# Altium integrated library SquidDebugger_V1.IntLib: 13 symbols
Pins are listed as number, name and electrical type; pins without a type are passive.

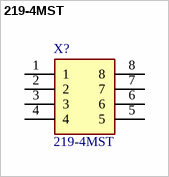
[diagram p0: symbol 219-4MST]

## 219-4MST
designator X?
DIP Switches / SIP Switches; Manufacturer_Name: CTS; Geometry.Height: 4.3mm; Manufacturer_Part_Number: 219-4MST; Mouser Part Number: 774-2194MST; Mouser Price/Stock: https://www.mouser.co.uk/ProductDetail/CTS-Electronic-Components/219-4MST?qs=qNzHFtQhdJ8xGV2Z9mul9A%3D%3D; Arrow Part Number: 219-4MST; Arrow Price/Stock: https://www.arrow.com/en/products/219-4mst/cts; Datasheet Link: https://componentsearchengine.com/Datasheets/1/219-4MST.pdf
footprint 2194MST
pins: 1, 2, 3, 4, 5, 6, 7, 8


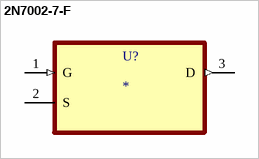
[diagram p1: symbol 2N7002-7-F]

## 2N7002-7-F
designator U?
N-Channel 60 V 115mA (Ta) 370mW (Ta) Surface Mount SOT-23-3; MP: 2N7002-7-F; MF: Diodes Inc.; Purchase-URL: https://pricing.snapeda.com/search/part/2N7002-7-F/?ref=eda; Package: SOT-23-3 Diodes Inc.; Price: None; Availability: In Stock; Value: *; Check_prices: https://www.snapeda.com/parts/2N7002-7-F/Diodes+Inc./view-part/?ref=eda; SnapEDA_Link: https://www.snapeda.com/parts/2N7002-7-F/Diodes+Inc./view-part/?ref=snap
footprint SOT103P240X110-3N
pins: 1 G (in), 2 S, 3 D (out)


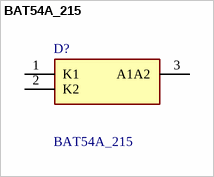
[diagram p2: symbol BAT54A_215]

## BAT54A_215
designator D?
Diode Array 1 Pair Common Anode 30 V 200mA (DC) Surface Mount TO-236-3, SC-59, SOT-23-3; Manufacturer_Name: Nexperia; Manufacturer_Part_Number: BAT54A,215; Geometry.Height: 1.1mm; Mouser Part Number: 771-BAT54A-T/R; Mouser Price/Stock: https://www.mouser.co.uk/ProductDetail/Nexperia/BAT54A215?qs=me8TqzrmIYV%252BITv%2F8aeieg%3D%3D; Arrow Part Number: BAT54A,215; Arrow Price/Stock: https://www.arrow.com/en/products/bat54a215/nexperia.html?utm_currency=USD&region=europe; Datasheet Link: https://assets.nexperia.com/documents/data-sheet/BAT54A.pdf
footprint SOT95P230X110-3N
pins: 1 K1, 2 K2, 3 A1A2


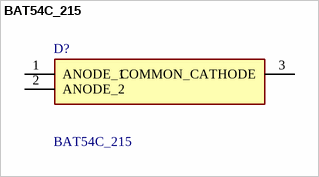
[diagram p3: symbol BAT54C_215]

## BAT54C_215
designator D?
Schottky barrier diode,BAT54C 0.2A 30V NXP BAT54C,215, Dual SMT Schottky Diode, Common Cathode, 30V 200mA, 5ns, 3-Pin TO-236AB; Manufacturer_Name: Nexperia; Geometry.Height: 1.1mm; Manufacturer_Part_Number: BAT54C,215; Mouser Part Number: 771-BAT54C-T/R; Mouser Price/Stock: https://www.mouser.co.uk/ProductDetail/Nexperia/BAT54C215?qs=me8TqzrmIYV5SKKt13YKQA%3D%3D; Arrow Part Number: BAT54C,215; Arrow Price/Stock: https://www.arrow.com/en/products/bat54c215/nexperia.html?utm_currency=USD&region=asia; Datasheet Link: https://assets.nexperia.com/documents/data-sheet/BAT54_SER.pdf
footprint BAT54C215
pins: 1 ANODE_1, 2 ANODE_2, 3 COMMON_CATHODE


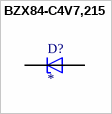
[diagram p4: symbol BZX84-C4V7,215]

## BZX84-C4V7,215
designator D?
MF: {'manufacturer': u'Nexperia USA Inc.'}; MP: BZX84-C4V7,215; Package: None; Price: None; Value: *; Availability: Unavailable
footprint SOT95P230X110-3N
pins: 1 A, 3 C


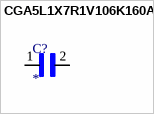
[diagram p5: symbol CGA5L1X7R1V106K160AE]

## CGA5L1X7R1V106K160AE
designator C?
10 ÂµF Â±10% 35V é™¶ç“·ç”µå®¹å™¨ X7R 1206ï¼ˆ3216 å…¬åˆ¶ï¼‰; MF: TDK; MP: CGA5L1X7R1V106K160AE; Package: 3216 TDK; Price: None; Check_prices: https://www.snapeda.com/parts/CGA5L1X7R1V106K160AE/TDK/view-part/?ref=eda; Value: *; SnapEDA_Link: https://www.snapeda.com/parts/CGA5L1X7R1V106K160AE/TDK/view-part/?ref=snap; Availability: In Stock; Purchase-URL: https://pricing.snapeda.com/search/part/CGA5L1X7R1V106K160AE/?ref=eda
footprint CAPC3216X190N
pins: 1, 2


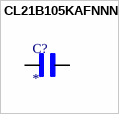
[diagram p6: symbol CL21B105KAFNNNE]

## CL21B105KAFNNNE
designator C?
1 ÂµF Â±10% 25V Ceramic Capacitor X7R 0805 (2012 Metric); MF: Samsung Electro-Mechanics; MP: CL21B105KAFNNNE; SnapEDA_Link: https://www.snapeda.com/parts/CL21B105KAFNNNE/Samsung/view-part/?ref=snap; Package: SMD-2 Samsung; Value: *; Check_prices: https://www.snapeda.com/parts/CL21B105KAFNNNE/Samsung/view-part/?ref=eda
footprint CAPC2012X135N
pins: 1, 2


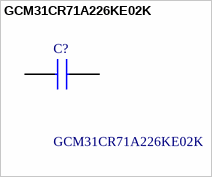
[diagram p7: symbol GCM31CR71A226KE02K]

## GCM31CR71A226KE02K
designator C?
Capacitor GCM31 L=3.2mm W=1.6mm T=1.6mm; Manufacturer_Name: Murata Electronics; Geometry.Height: 1.8mm; Manufacturer_Part_Number: GCM31CR71A226KE02K; Mouser Part Number: 81-GCM31CR71A226KE2K; Mouser Price/Stock: https://www.mouser.co.uk/ProductDetail/Murata-Electronics/GCM31CR71A226KE02K?qs=QzBtWTOodeVgM6QlH6X51g%3D%3D; Arrow Part Number: GCM31CR71A226KE02K; Arrow Price/Stock: https://www.arrow.com/en/products/gcm31cr71a226ke02k/murata-manufacturing?region=nac; Datasheet Link: https://search.murata.co.jp/Ceramy/image/img/A01X/G101/ENG/GCM31CR71A226KE02-01A.pdf
footprint CAPC3116X180N
pins: 1, 2


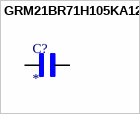
[diagram p8: symbol GRM21BR71H105KA12L]

## GRM21BR71H105KA12L
designator C?
SMD Capacitor X7R(EIA) with Capacitance: 1.0uF Tol. 10%. Rated Voltage: 50Vdc; MF: Murata; MP: GRM21BR71H105KA12L; SnapEDA_Link: https://www.snapeda.com/parts/GRM21BR71H105KA12L/Murata/view-part/?ref=snap; Package: 805-2 Murata; Value: *; Check_prices: https://www.snapeda.com/parts/GRM21BR71H105KA12L/Murata/view-part/?ref=eda
footprint CAPC2012X135N
pins: 1, 2


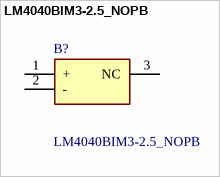
[diagram p9: symbol LM4040BIM3-2.5_NOPB]

## LM4040BIM3-2.5_NOPB
designator B?
100-ppm/C precision micropower shunt voltage reference; Manufacturer_Name: Texas Instruments; Manufacturer_Part_Number: LM4040BIM3-2.5/NOPB; Geometry.Height: 1.12mm; Mouser Part Number: 926-LM4040BIM325NOPB; Mouser Price/Stock: https://www.mouser.co.uk/ProductDetail/Texas-Instruments/LM4040BIM3-2.5-NOPB?qs=QbsRYf82W3GDmxxHwxXlYw%3D%3D; Arrow Part Number: LM4040BIM3-2.5/NOPB; Arrow Price/Stock: https://www.arrow.com/en/products/lm4040bim3-2.5nopb/texas-instruments; Datasheet Link: https://datasheet.datasheetarchive.com/originals/distributors/Datasheets-DGA16/867642.pdf
footprint SOT95P237X112-3N
pins: 1 +, 2 -, 3 NC


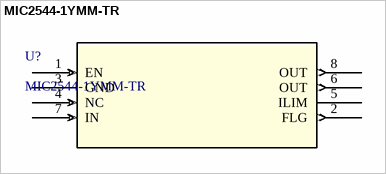
[diagram p10: symbol MIC2544-1YMM-TR]

## MIC2544-1YMM-TR
designator U?
No Description Available; Manufacturer_Name: Microchip; Copyright: Copyright (C) 2026 Ultra Librarian. All rights reserved.; Manufacturer_Part_Number: MIC2544-1YMM-TR; RefDes: RefDes; Type: Type
footprint MSOP-8_MM_MCH
pins: 1 EN (in), 2 FLG (out), 3 GND (power), 4 NC (in), 5 ILIM, 6 OUT (out), 7 IN (in), 8 OUT (out)


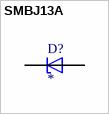
[diagram p11: symbol SMBJ13A]

## SMBJ13A
designator D?
600W, 15.2V, 5%, Unidirectional, TVS; MF: Taiwan Semiconductor Corporation; MP: SMBJ13A; SnapEDA_Link: https://www.snapeda.com/parts/SMBJ13A/taiwan/view-part/?ref=snap; Package: SMD-2 Taiwan Semiconductor; Value: *; Check_prices: https://www.snapeda.com/parts/SMBJ13A/taiwan/view-part/?ref=eda
footprint DIOM4336X265N
pins: A, C


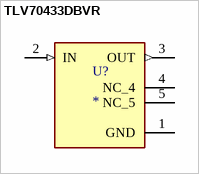
[diagram p12: symbol TLV70433DBVR]

## TLV70433DBVR
designator U?
150-mA 24-V ultra-low-IQ low-dropout (LDO) voltage regulator; MF: Texas Instruments; MP: TLV70433DBVR; SnapEDA_Link: https://www.snapeda.com/parts/TLV70433DBVR/Texas+Instruments/view-part/?ref=snap; Package: SOT-23-5 Texas Instruments; Value: *; Check_prices: https://www.snapeda.com/parts/TLV70433DBVR/Texas+Instruments/view-part/?ref=eda
footprint SOT95P280X145-5N
pins: 1 GND (power), 2 IN (in), 3 OUT (out), 4 NC_4, 5 NC_5